# Altium footprint library ME6211C12M5G-N_C236672.PcbLib: 1 footprints
Each footprint in its own frame and in the unit in brackets; x right, y up, seen from the top. Pads: shape width x height; smd on the part's side, far side on the other; paste and mask are expansions set on the pad; w line width, h text height; cw(c..) or ccw(c..) is an arc to the next point about the centre after c.
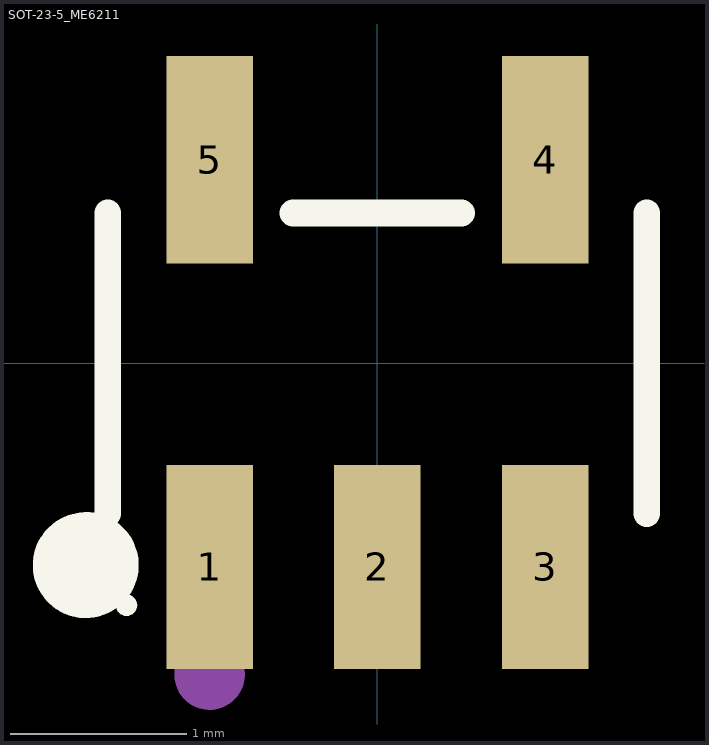
[diagram p0: the footprint, top view; thin cyan lines are the x and y axes]

## SOT-23-5_ME6211 [mm] "1.2V 300mA 6V 输出极性:正极 工作电压:6V 输出电压:1.2V 输出电流:300mA 电源纹波抑制比(PSRR):70dB@(1kHz) 输出类型:固定 型号:ME6211C12M5G-N LCSC C236672 厂牌:MICRONE(南京微盟)"
height 1
pads (5):
  rect 0.49x1.157 smd mask+0.05: 1(-0.95,-1.154) 2(0,-1.154) 3(0.95,-1.154)
  rect 0.49x1.175 smd mask+0.05: 4(0.95,1.154) 5(-0.95,1.154)
Top Overlay:
  circle w0.3: c-1.651,-1.143 r0.15
  region: -1.36,-1.37 -1.361,-1.358 -1.365,-1.347 -1.37,-1.337 -1.378,-1.328 -1.387,-1.32 -1.397,-1.315 -1.408,-1.311 -1.42,-1.31 -1.432,-1.311 -1.443,-1.315 -1.453,-1.32 -1.463,-1.328 -1.47,-1.337 -1.476,-1.347 -1.479,-1.358 -1.48,-1.37 -1.479,-1.382 -1.476,-1.393 -1.47,-1.403 -1.463,-1.412 -1.453,-1.42 -1.443,-1.425 -1.432,-1.429 -1.42,-1.43 -1.408,-1.429 -1.397,-1.425 -1.387,-1.42 -1.378,-1.412 -1.37,-1.403 -1.365,-1.393 -1.361,-1.382
  lines w0.152: -1.526,-0.851 -1.526,0.851 ; -0.476,0.851 0.476,0.851 ; 1.526,-0.851 1.526,0.851
Mechanical 2:
  circle w0.2: c-0.95,-1.763 r0.1
3D body "SOT-23-5_L3.0-W1.7-P0.95-LS2.8-BL.step": height 1, standoff 0, extent -1.901,-1.963 1.626,1.841